# Altium footprint library aksima_footprint.PcbLib: 77 footprints (part 3 of 5)
Each footprint in its own frame and in the unit in brackets; x right, y up, seen from the top. Pads: shape width x height; smd on the part's side, far side on the other; paste and mask are expansions set on the pad; w line width, h text height; cw(c..) or ccw(c..) is an arc to the next point about the centre after c.
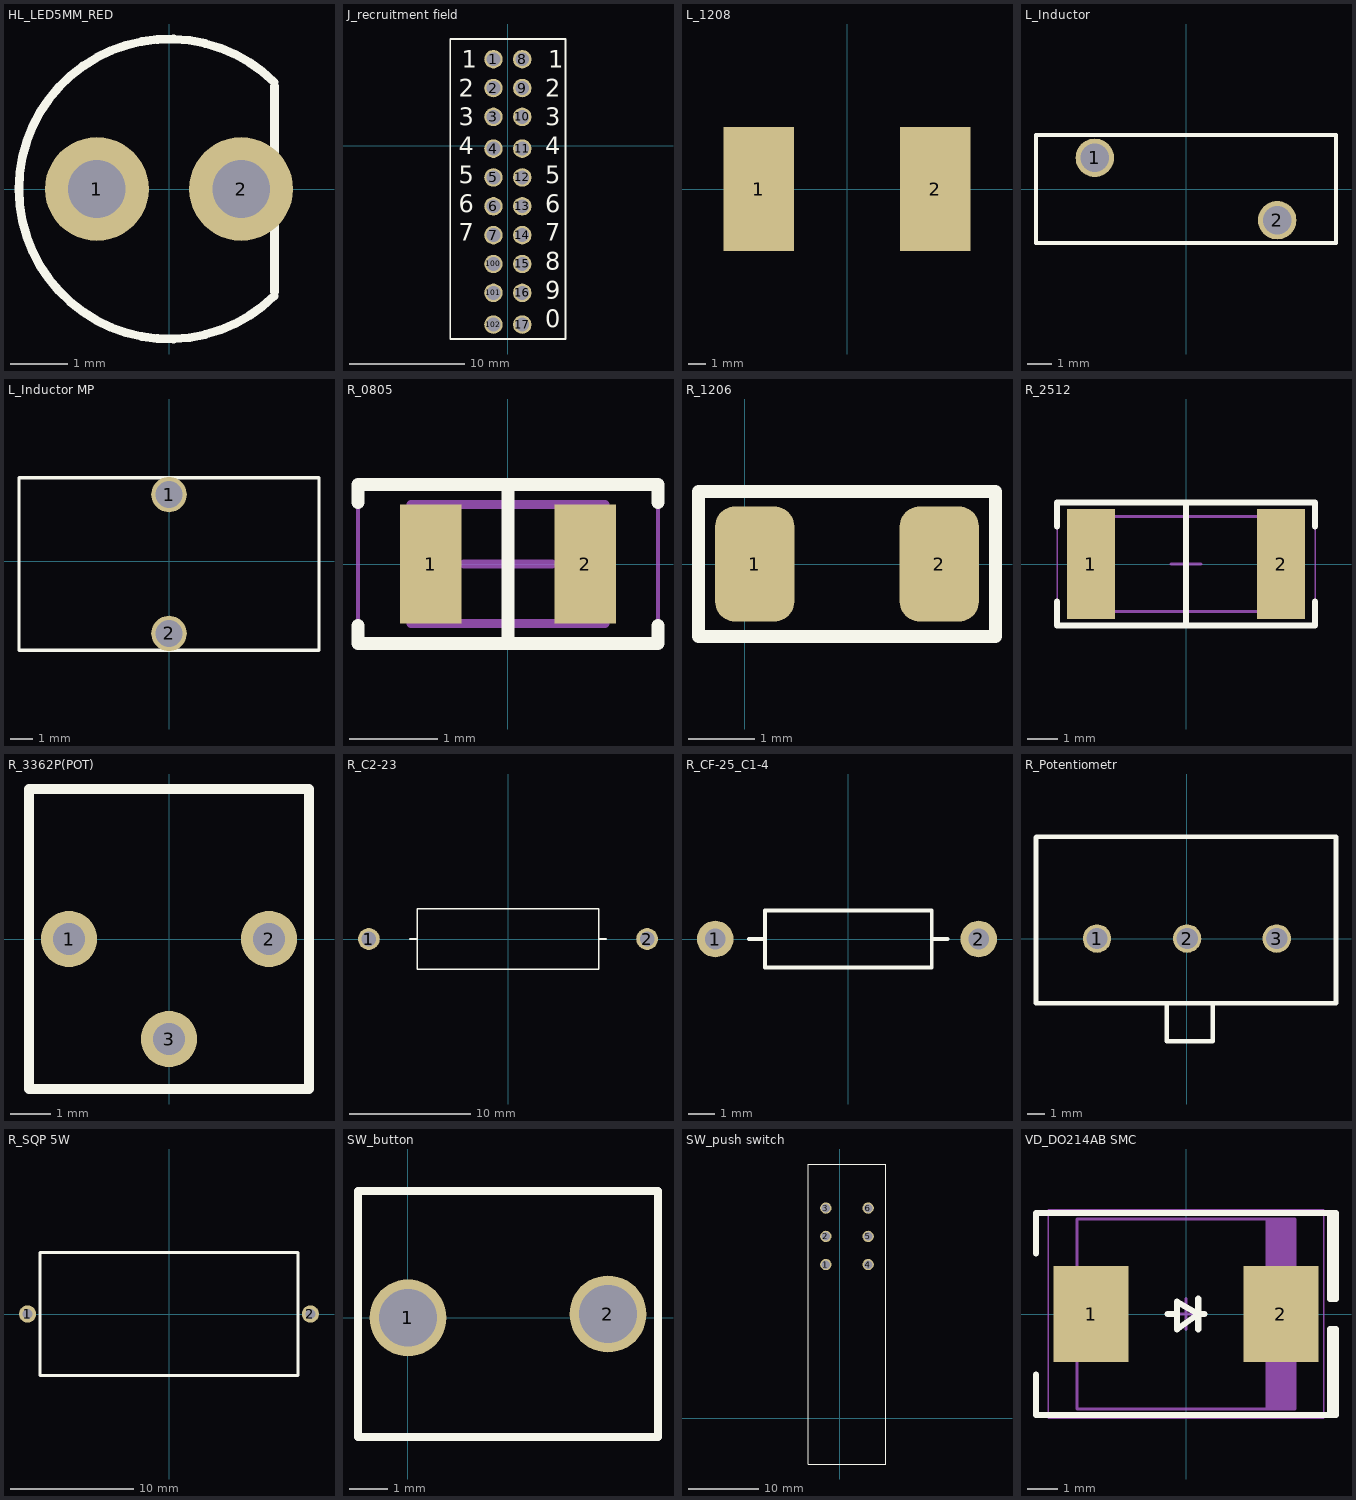
[diagram p2: the footprints below, top view; thin cyan lines are the x and y axes]

## HL_LED5MM_RED [mm] "Red LED, 5 mm body"
pads (2):
  round 1.8 hole 1: 1(-1.25,0) 2(1.25,0)
Top Overlay:
  lines w0.15: 1.823,-1.853 cw(c0,0) 1.824,1.853 ; 1.829,-1.781 1.829,1.781
3D body "Led 5mm red_.step": height 8.5, standoff -28, extent -2.7,-2.7 2.7,2.7

## J_recruitment field [mm] "Prototyping pad field"
pads (20):
  round 1.6 hole 1.2 unplated: 1(-1.25,7.5) 2(-1.25,5) 3(-1.25,2.5) 4(-1.25,-0.25) 5(-1.25,-2.75) 6(-1.25,-5.25) 7(-1.25,-7.75) 8(1.25,7.5) 9(1.25,5) 10(1.25,2.5) 11(1.25,-0.25) 12(1.25,-2.75) 13(1.25,-5.25) 14(1.25,-7.75) 15(1.25,-10.25) 16(1.25,-12.75) 17(1.25,-15.5) 100(-1.25,-10.25) 101(-1.25,-12.75) 102(-1.25,-15.5)
Top Overlay:
  lines w0.15: -5,-16.75 5,-16.75 5,9.25 -5,9.25 -5,-16.75
  text "1" at -3.996,6.754 h1.52
  text "2" at -4.246,4.254 h1.52
  text "3" at -4.246,1.754 h1.52
  text "4" at -4.246,-0.746 h1.52
  text "5" at -4.246,-3.246 h1.52
  text "6" at -4.246,-5.746 h1.52
  text "7" at -4.246,-8.246 h1.52
  text "1" at 3.504,6.754 h1.52
  text "2" at 3.254,4.254 h1.52
  text "3" at 3.254,1.754 h1.52
  text "4" at 3.254,-0.746 h1.52
  text "5" at 3.254,-3.246 h1.52
  text "6" at 3.254,-5.746 h1.52
  text "7" at 3.254,-8.246 h1.52
  text "8" at 3.254,-10.746 h1.52
  text "9" at 3.254,-13.246 h1.52
  text "0" at 3.254,-15.746 h1.52
3D body "PLD-20.step": height 8.6, standoff -3, extent -2.54,-16.65 2.54,8.75

## L_1208 [mm] "Inductor footprint, 1208"
pads (2):
  rect 4x7 smd: 1(-5,0) 2(5,0)
3D body "L_12x12mm_H8mm.step": height 7.46, standoff -0.1, extent -6,-6 6,6

## L_Inductor [mm] "Inductor footprint, Inductor"
pads (2):
  round 1.6 hole 1.2: 1(-3.8,1.3) 2(3.8,-1.3)
Top Overlay:
  lines w0.15: -6.25,-2.25 6.25,-2.25 6.25,2.25 -6.25,2.25 -6.25,-2.25
3D body "inductor p7.77mm.stp": height 3.35, standoff -2.85, extent -6.15,-1.6 6.15,1.6

## L_Inductor MP [mm] "Inductor footprint, Inductor MP"
pads (2):
  round 1.6 hole 1.2: 1(0,3) 2(0,-3.25)
Top Overlay:
  lines w0.15: -6.75,-4 -6.75,3.5 -6.75,3.75 6.75,3.75 6.75,-4 -6.75,-4
3D body "Toroidal inductor D13mm.stp": height 13.82, standoff -2, extent -6.619,-3.5 6.619,3.24

## R_0805 [mm] "Chip Resistor, 2-Leads, Body 2.00x1.25mm, IPC Medium Density"
height 0.7
pads (2):
  rect 0.7x1.35 smd: 1(-0.875,0) 2(0.875,0)
Top Overlay:
  lines w0.15: -1.7,-0.7 -1.7,-0.9 1.7,-0.9 1.7,-0.7 ; -1.7,0.7 -1.7,0.9 1.7,0.9 1.7,0.7 ; 0,-0.9 0,0.9
Mechanical 13:
  lines w0.1: -1.1,-0.675 1.1,-0.675 1.1,0.675 -1.1,0.675 -1.1,-0.675
Mechanical 15:
  lines w0.05: -1.7,-0.95 1.7,-0.95 1.7,0.95 -1.7,0.95 -1.7,-0.95
  lines w0.1: -0.5,0 0.5,0 ; 0,-0.5 0,0.5
3D body "0805 resistor.STEP": height 0.6, standoff 0, extent -1,-0.625 1,0.625

## R_1206 [mm] "Resistor footprint, 1206"
pads (2):
  rrect50% 1.2x1.75 smd: 1(0.15,0) 2(2.95,0)
Top Overlay:
  lines w0.2: -0.7,-1.1 -0.7,1.1 3.8,1.1 3.8,-1.1 -0.7,-1.1
3D body "RES_3216_1206.step": height 0.85, standoff 0, extent -0.125,-0.865 3.225,0.865

## R_2512 [mm] "Chip Resistor, 2-Leads, Body 6.30x3.15mm, IPC Medium Density"
height 0.6
pads (2):
  rect 1.6x3.65 smd: 1(-3.175,0) 2(3.175,0)
Top Overlay:
  lines w0.2: -4.3,-1.25 -4.3,-2.05 4.3,-2.05 4.3,-1.25 ; -4.3,1.25 -4.3,2.05 4.3,2.05 4.3,1.25 ; 0,-2.05 0,2.05
Mechanical 13:
  lines w0.1: -3.149,-1.575 -3.149,1.575 3.15,1.575 3.15,1.225 3.15,-1.575 -3.149,-1.575
Mechanical 15:
  lines w0.05: -4.3,-2.1 -4.3,2.1 4.3,2.1 4.3,-2.1 -4.3,-2.1
  lines w0.1: -0.5,0 0.5,0 ; 0,-0.5 0,0.5
3D body "RES - 2512.step": height 0.7, standoff 0, extent -3.15,-1.575 3.15,1.575

## R_3362P(POT) [mm] "Resistor footprint, 3362P(POT)"
pads (3):
  round 1.4 hole 0.8: 1(-2.5,0) 2(2.5,0) 3(0,-2.5)
Top Overlay:
  lines w0.254: -3.5,-3.75 3.5,-3.75 3.5,3.75 -3.5,3.75 -3.5,-3.75
3D body "3362 smd resistor pot v2.step": height 4.56, standoff -5.84, extent -3.3,-3.495 3.3,3.495

## R_C2-23 [mm] "Resistor footprint, C2-23"
pads (2):
  round 1.8 hole 1.2: 1(-11.5,0) 2(11.5,0)
Top Overlay:
  lines w0.15: -8.1,0 -7.5,0 ; 7.5,0 8.1,0 ; -7.5,-2.5 -1.4,-2.5 7.5,-2.5 7.5,2.5 -7.5,2.5 -7.5,-2.5
3D body "Res-2w-5-15mm-900.step": height 6.5, standoff -1.5, extent -11.83,-2.5 11.83,2.5

## R_CF-25_C1-4 [mm] "Axial resistor, CF-25 / C1-4"
pads (2):
  round 1.4 hole 0.8: 1(-5.1,0) 2(5,0)
Top Overlay:
  lines w0.15: -3.8,0 -3.2,0 ; 3.2,0 3.8,0 ; -3.2,-1.1 -3.2,1.1 3.2,1.1 3.2,-1.1 0,-1.1 -3.2,-1.1
3D body "2.7R 0.4.STEP": height 2.93, standoff -2.54, extent -5.47,-1.156 5.3,1.156

## R_Potentiometr [mm] "Potentiometer, original library value 50 kOhm"
pads (3):
  round 1.6 hole 1.2: 1(-5.062,0) 2(0.013,0) 3(5.063,0)
Top Overlay:
  lines w0.254: -1.125,-3.65 -1.125,-5.775 1.45,-5.775 1.45,-3.65 ; -8.5,-3.65 -8.5,5.7 -8.475,5.725 8.4,5.725 8.4,-3.65 -8.5,-3.65
3D body "POT10K.step": height 22.5, standoff -3, extent -8.486,-18.45 8.511,5.75

## R_SQP 5W [mm] "Wirewound power resistor, SQP 5 W"
pads (2):
  round 1.4 hole 0.8: 1(-11.5,0) 2(11.5,0)
Top Overlay:
  lines w0.254: -10.5,-5 10.5,-5 10.5,5 -10.5,5 -10.5,-5
3D body "RES_SQPH_5W_900mil_0R_J(5%).STEP": height 10, standoff -3.6, extent -11.88,-5 11.88,5

## SW_button [mm] "Switch footprint, button"
pads (2):
  round 2 hole 1.5: 1(0,0) 2(5.2,0.1)
Top Overlay:
  lines w0.2: -1.3,-3.1 -1.3,-0.825 -1.3,0.625 -1.3,3.3 6.5,3.3 6.5,-3.1 -1.3,-3.1

## SW_push switch [mm] "Switch footprint, push switch"
pads (6):
  round 1.6 hole 1.2 unplated: 1(-2,21.75) 2(-2,25.75) 3(-2,29.75) 4(4,21.75) 5(4,25.75) 6(4,29.75)
Top Overlay:
  lines w0.15: -4.5,-6.5 6.5,-6.5 6.5,36 -4.5,36 -4.5,-6.5
3D body "2 - -2.stp": height 12.5, standoff -3, extent -4,-6 6,35.5

## VD_DO214AB SMC [mm] "Molded Diode, 2-Leads, Body 6.85x5.90mm, IPC Medium Density"
height 2.62
pads (2):
  rect 2.45x3.15 smd: 1(-3.1,0) 2(3.1,0)
Top Overlay:
  lines w0.2: -4.9,-1.975 -4.9,-3.3 4.9,-3.3 4.9,-0.5 4.7,-0.5 4.7,-3.3 ; -4.9,1.975 -4.9,3.3 4.9,3.3 4.9,0.5 4.7,0.5 4.7,3.3 ; -0.6,0 -0.3,0 ; 0.4,-0.5 0.4,0.5 ; 0.6,0 0.4,0 ; 0.4,0 -0.3,-0.5 -0.3,0.4 0.4,0
Mechanical 13:
  rectangle: 2.599,-3.11 3.555,3.11
  lines w0.1: -3.555,-3.11 3.555,-3.11 3.555,3.11 -3.555,3.11 -3.555,-3.11
Mechanical 15:
  lines w0.05: -4.5,-3.4 4.5,-3.4 4.5,3.4 -4.5,3.4 -4.5,-3.4
  lines w0.1: -0.5,0 0.5,0 ; 0,-0.5 0,0.5
3D body "SMC.STEP": height 2.6, standoff 0, extent -3.97,-2.952 3.97,2.952